# Altium footprint library Miscellaneous Devices.PcbLib: 306 footprints (part 5 of 20)
Each footprint in its own frame and in the unit in brackets; x right, y up, seen from the top. Pads: shape width x height; smd on the part's side, far side on the other; paste and mask are expansions set on the pad; w line width, h text height; cw(c..) or ccw(c..) is an arc to the next point about the centre after c.
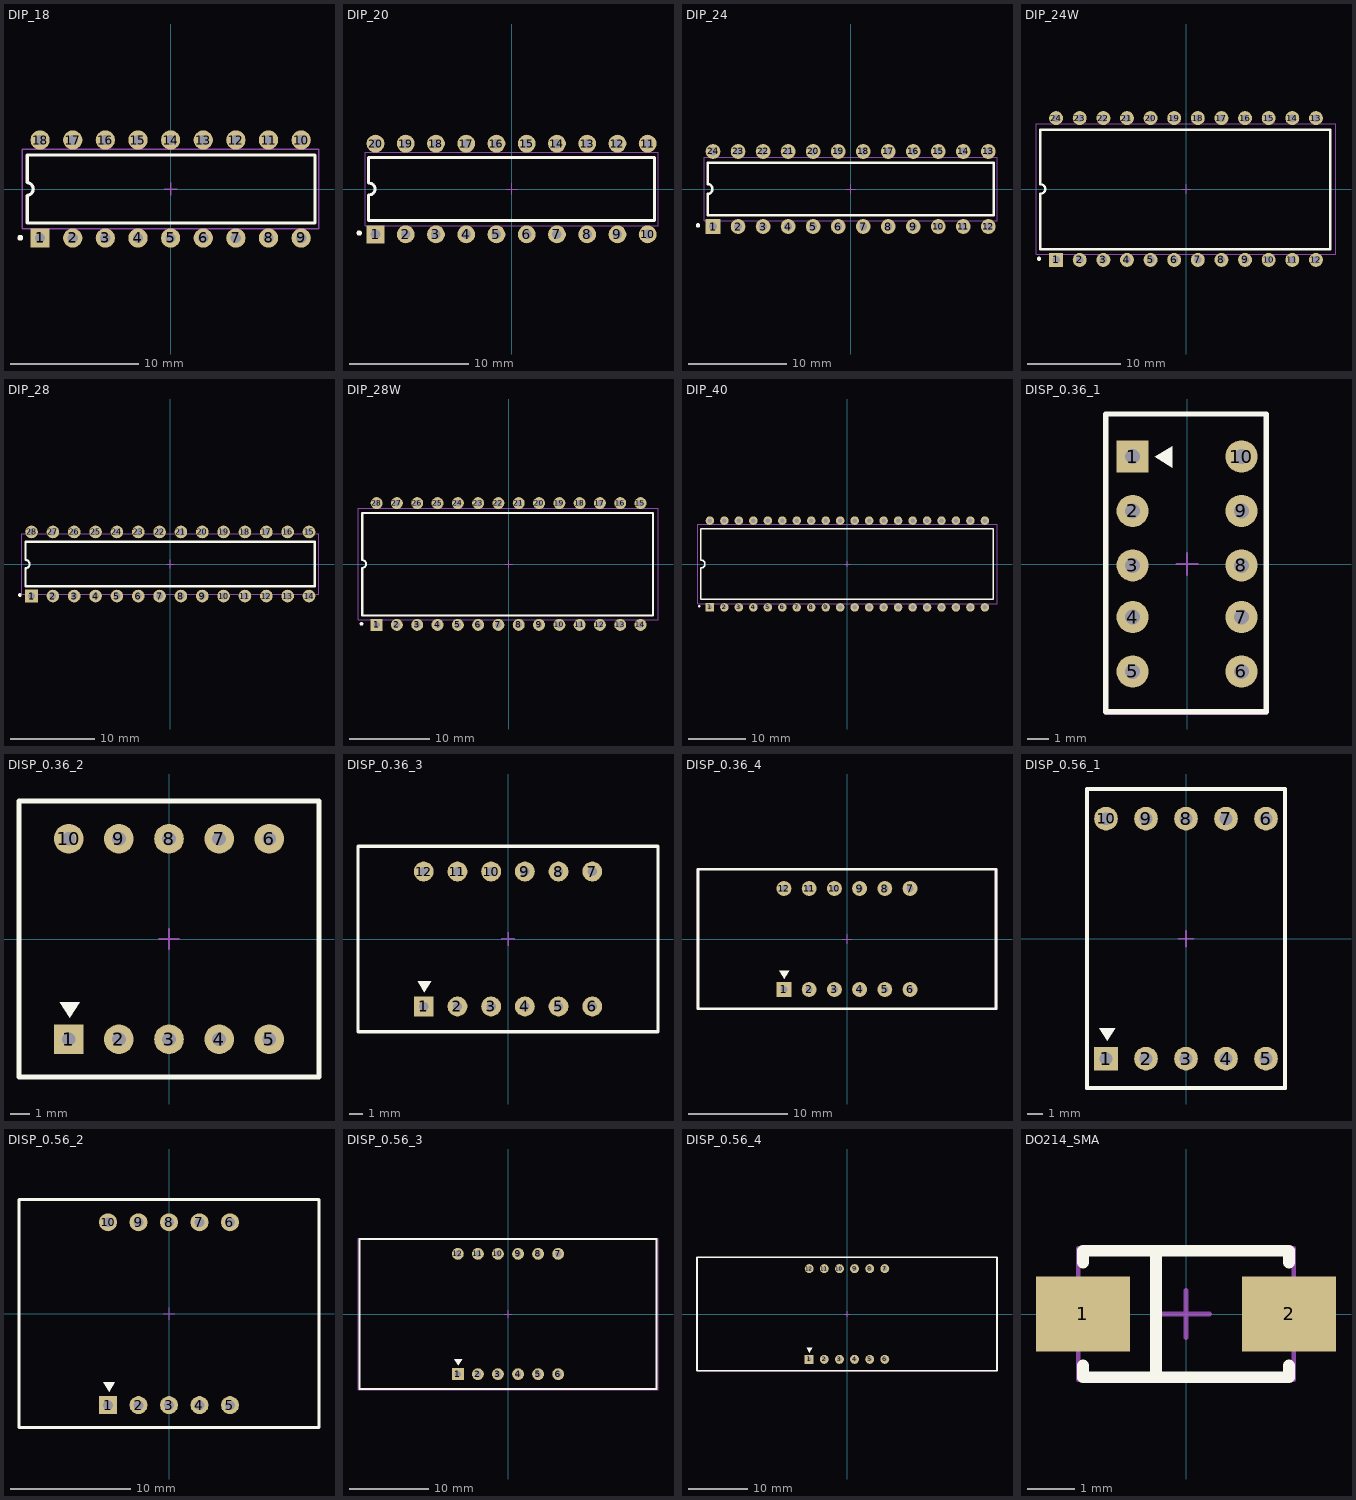
[diagram p4: the footprints below, top view; thin cyan lines are the x and y axes]

## DIP_18 [mm] "7.62"
pads (18):
  rect 1.5x1.5 hole 0.8: 1(-10.16,-3.81)
  round 1.5 hole 0.8: 2(-7.62,-3.81) 3(-5.08,-3.81) 4(-2.54,-3.81) 5(0,-3.81) 6(2.54,-3.81) 7(5.08,-3.81) 8(7.62,-3.81) 9(10.16,-3.81) 10(10.16,3.81) 11(7.62,3.81) 12(5.08,3.81) 13(2.54,3.81) 14(0,3.81) 15(-2.54,3.81) 16(-5.08,3.81) 17(-7.62,3.81) 18(-10.16,3.81)
Top Overlay:
  circle w0.254: c-11.7,-3.8 r0.1
  lines w0.254: -11.16,-2.65 11.23,-2.65 11.23,2.65 -11.16,2.65 -11.16,0.5 cw(c-11.2,0) -11.16,-0.5 -11.16,-2.65
Mechanical 15:
  lines w0.1: -0.5,0 0.5,0 ; 0,-0.5 0,0.5 ; -11.55,-3.1 -11.55,3.1 11.55,3.1 11.55,-3.1 -11.55,-3.1
3D body: height 4.57, standoff -3.81, extent -11.61,-3.9 11.63,3.92

## DIP_20 [mm] "7.62"
pads (20):
  rect 1.5x1.5 hole 0.8: 1(-11.43,-3.81)
  round 1.5 hole 0.8: 2(-8.89,-3.81) 3(-6.35,-3.81) 4(-3.81,-3.81) 5(-1.27,-3.81) 6(1.27,-3.81) 7(3.81,-3.81) 8(6.35,-3.81) 9(8.89,-3.81) 10(11.43,-3.81) 11(11.43,3.81) 12(8.89,3.81) 13(6.35,3.81) 14(3.81,3.81) 15(1.27,3.81) 16(-1.27,3.81) 17(-3.81,3.81) 18(-6.35,3.81) 19(-8.89,3.81) 20(-11.43,3.81)
Top Overlay:
  circle w0.254: c-12.8,-3.7 r0.1
  lines w0.254: -12,-2.65 -12,-0.5 ccw(c-11.97,0) -12,0.5 -12,2.65 12,2.65 12,-2.65 -12,-2.65
Mechanical 15:
  lines w0.1: -0.5,0 0.5,0 ; 0,-0.5 0,0.5 ; -12.3,-3.1 -12.3,3.1 12.3,3.1 12.3,-3.1 -12.3,-3.1
3D body: height 4.65, standoff -1.57, extent -12.89,-3.9 12.89,3.974

## DIP_24 [mm] "7.62"
pads (24):
  rect 1.5x1.5 hole 0.8: 1(-13.97,-3.81)
  round 1.5 hole 0.8: 2(-11.43,-3.81) 3(-8.89,-3.81) 4(-6.35,-3.81) 5(-3.81,-3.81) 6(-1.27,-3.81) 7(1.27,-3.81) 8(3.81,-3.81) 9(6.35,-3.81) 10(8.89,-3.81) 11(11.43,-3.81) 12(13.97,-3.81) 13(13.97,3.81) 14(11.43,3.81) 15(8.89,3.81) 16(6.35,3.81) 17(3.81,3.81) 18(1.27,3.81) 19(-1.27,3.81) 20(-3.81,3.81) 21(-6.35,3.81) 22(-8.89,3.81) 23(-11.43,3.81) 24(-13.97,3.81)
Top Overlay:
  circle w0.254: c-15.5,-3.7 r0.1
  lines w0.254: -14.5,-2.65 14.5,-2.65 14.5,2.65 -14.5,2.65 -14.5,0.5 cw(c-14.53,0) -14.5,-0.5 -14.5,-2.65
Mechanical 15:
  lines w0.1: -0.5,0 0.5,0 ; 0,-0.5 0,0.5 ; -14.85,-3.2 -14.85,3.2 14.85,3.2 14.85,-3.2 -14.85,-3.2
3D body: height 4.57, standoff -3.81, extent -16.03,-3.9 16.1,3.92

## DIP_24W [mm] "15.24"
pads (24):
  rect 1.5x1.5 hole 0.8: 1(-13.97,-7.62)
  round 1.5 hole 0.8: 2(-11.43,-7.62) 3(-8.89,-7.62) 4(-6.35,-7.62) 5(-3.81,-7.62) 6(-1.27,-7.62) 7(1.27,-7.62) 8(3.81,-7.62) 9(6.35,-7.62) 10(8.89,-7.62) 11(11.43,-7.62) 12(13.97,-7.62) 13(13.97,7.62) 14(11.43,7.62) 15(8.89,7.62) 16(6.35,7.62) 17(3.81,7.62) 18(1.27,7.62) 19(-1.27,7.62) 20(-3.81,7.62) 21(-6.35,7.62) 22(-8.89,7.62) 23(-11.43,7.62) 24(-13.97,7.62)
Top Overlay:
  circle w0.254: c-15.8,-7.5 r0.1
  lines w0.254: -15.67,-0.5 -15.67,-6.46 15.53,-6.46 15.53,6.38 -15.67,6.38 -15.67,0.5 ; -15.6,-0.5 ccw(c-15.63,0) -15.6,0.5
Mechanical 15:
  lines w0.1: -0.5,0 0.5,0 ; 0,-0.5 0,0.5 ; -16.13,-7 -16.13,7 16.13,7 16.13,-7 -16.13,-7
3D body: height 5.09, standoff -3.81, extent -16.13,-7.71 16.13,7.73

## DIP_28 [mm] "7.62"
pads (28):
  rect 1.5x1.5 hole 0.8: 1(-16.51,-3.81)
  round 1.5 hole 0.8: 2(-13.97,-3.81) 3(-11.43,-3.81) 4(-8.89,-3.81) 5(-6.35,-3.81) 6(-3.81,-3.81) 7(-1.27,-3.81) 8(1.27,-3.81) 9(3.81,-3.81) 10(6.35,-3.81) 11(8.89,-3.81) 12(11.43,-3.81) 13(13.97,-3.81) 14(16.51,-3.81) 15(16.51,3.81) 16(13.97,3.81) 17(11.43,3.81) 18(8.89,3.81) 19(6.35,3.81) 20(3.81,3.81) 21(1.27,3.81) 22(-1.27,3.81) 23(-3.81,3.81) 24(-6.35,3.81) 25(-8.89,3.81) 26(-11.43,3.81) 27(-13.97,3.81) 28(-16.51,3.81)
Top Overlay:
  circle w0.254: c-17.9,-3.7 r0.1
  lines w0.254: -17.21,-2.65 -17.21,-0.51 ccw(c-17.24,-0.01) -17.21,0.49 -17.21,2.65 17.19,2.65 17.19,-2.65 -17.21,-2.65
Mechanical 15:
  lines w0.1: -0.5,0 0.5,0 ; 0,-0.5 0,0.5 ; -17.7,-3.6 -17.7,3.6 17.7,3.6 17.7,-3.6 -17.7,-3.6
3D body: height 4.57, standoff -3.81, extent -17.56,-3.92 17.49,3.9

## DIP_28W [mm] "15.24"
pads (28):
  rect 1.5x1.5 hole 0.8: 1(-16.51,-7.62)
  round 1.5 hole 0.8: 2(-13.97,-7.62) 3(-11.43,-7.62) 4(-8.89,-7.62) 5(-6.35,-7.62) 6(-3.81,-7.62) 7(-1.27,-7.62) 8(1.27,-7.62) 9(3.81,-7.62) 10(6.35,-7.62) 11(8.89,-7.62) 12(11.43,-7.62) 13(13.97,-7.62) 14(16.51,-7.62) 15(16.51,7.62) 16(13.97,7.62) 17(11.43,7.62) 18(8.89,7.62) 19(6.35,7.62) 20(3.81,7.62) 21(1.27,7.62) 22(-1.27,7.62) 23(-3.81,7.62) 24(-6.35,7.62) 25(-8.89,7.62) 26(-11.43,7.62) 27(-13.97,7.62) 28(-16.51,7.62)
Top Overlay:
  circle w0.254: c-18.4,-7.5 r0.1
  lines w0.254: -18.31,-6.46 -18.31,-0.5 ccw(c-18.34,0) -18.31,0.5 -18.31,6.38 18.09,6.38 18.09,-6.46 -18.31,-6.46
Mechanical 15:
  lines w0.1: -0.5,0 0.5,0 ; 0,-0.5 0,0.5 ; -18.8,-7 18.7,-7 18.7,7 -18.8,7 -18.8,-7
3D body: height 5.09, standoff -3.81, extent -18.71,-7.76 18.63,7.68

## DIP_40 [mm] "15.24"
pads (40):
  rect 1.5x1.5 hole 0.8: 1(-24.13,-7.62)
  round 1.5 hole 0.8: 2(-21.59,-7.62) 3(-19.05,-7.62) 4(-16.51,-7.62) 5(-13.97,-7.62) 6(-11.43,-7.62) 7(-8.89,-7.62) 8(-6.35,-7.62) 9(-3.81,-7.62) 10(-1.27,-7.62) 11(1.27,-7.62) 12(3.81,-7.62) 13(6.35,-7.62) 14(8.89,-7.62) 15(11.43,-7.62) 16(13.97,-7.62) 17(16.51,-7.62) 18(19.05,-7.62) 19(21.59,-7.62) 20(24.13,-7.62) 21(24.13,7.62) 22(21.59,7.62) 23(19.05,7.62) 24(16.51,7.62) 25(13.97,7.62) 26(11.43,7.62) 27(8.89,7.62) 28(6.35,7.62) 29(3.81,7.62) 30(1.27,7.62) 31(-1.27,7.62) 32(-3.81,7.62) 33(-6.35,7.62) 34(-8.89,7.62) 35(-11.43,7.62) 36(-13.97,7.62) 37(-16.51,7.62) 38(-19.05,7.62) 39(-21.59,7.62) 40(-24.13,7.62)
Top Overlay:
  circle w0.254: c-26,-7.4 r0.1
  lines w0.254: -25.7,-6.2 -25.7,-0.7 ccw(c-25.7,0) -25.7,0.7 -25.7,6.2 25.6,6.2 25.6,-6.2 -25.7,-6.2
Mechanical 15:
  lines w0.1: -0.5,0 0.5,0 ; 0,-0.5 0,0.5 ; -26.25,-7 26.25,-7 26.25,7 -26.25,7 -26.25,-7
3D body: height 5.7, standoff -2.58, extent -26.225,-7.8 26.225,7.69

## DISP_0.36_1 [mm]
pads (10):
  rect 1.5x1.5 hole 0.7: 1(-2.54,5.017)
  round 1.5 hole 0.7: 2(-2.54,2.477) 3(-2.54,-0.063) 4(-2.54,-2.476) 5(-2.54,-5.016) 6(2.54,-5.016) 7(2.54,-2.476) 8(2.54,-0.063) 9(2.54,2.477) 10(2.54,5.017)
Top Overlay:
  region: -1.5,5 -0.7,5.5 -0.7,4.5
  lines w0.254: -3.8,-6.9 -3.8,7 3.7,7 3.7,-6.9 -3.8,-6.9
Mechanical 15:
  lines w0.1: -0.5,0 0.5,0 ; 0,-0.5 0,0.5 ; -3.8,-7 -3.8,7 3.7,7 3.7,-7 -3.8,-7
3D body: height 8.53, standoff -3.97, extent -3.8,-7 3.7,7

## DISP_0.36_2 [mm]
pads (10):
  rect 1.5x1.5 hole 0.7: 1(-5.08,-5.08)
  round 1.5 hole 0.7: 2(-2.54,-5.08) 3(0,-5.08) 4(2.54,-5.08) 5(5.08,-5.08) 6(5.08,5.08) 7(2.54,5.08) 8(0,5.08) 9(-2.54,5.08) 10(-5.08,5.08)
Top Overlay:
  region: -5.03,-4 -5.53,-3.2 -4.53,-3.2
  lines w0.254: -7.6,-7 -7.6,7 7.6,7 7.6,-7 -7.6,-7
Mechanical 15:
  lines w0.1: -0.5,0 0.5,0 ; 0,-0.5 0,0.5 ; -7.6,-7 7.6,-7 7.6,7 -7.6,7 -7.6,-7
3D body: height 7.3, standoff -3.9, extent -7.75,-7.5 7.75,7.5

## DISP_0.36_3 [mm]
pads (12):
  rect 1.5x1.5 hole 0.7: 1(-6.35,-5.08)
  round 1.5 hole 0.7: 2(-3.81,-5.08) 3(-1.27,-5.08) 4(1.27,-5.08) 5(3.81,-5.08) 6(6.35,-5.08) 7(6.35,5.08) 8(3.81,5.08) 9(1.27,5.08) 10(-1.27,5.08) 11(-3.81,5.08) 12(-6.35,5.08)
Top Overlay:
  region: -6.3,-4 -6.8,-3.2 -5.8,-3.2
  lines w0.254: -11.3,-7 -11.3,7 11.3,7 11.3,-7 -11.3,-7
Mechanical 15:
  lines w0.1: -0.5,0 0.5,0 ; 0,-0.5 0,0.5 ; -11.3,-7 11.3,-7 11.3,7 -11.3,7 -11.3,-7
3D body: height 7.1, standoff -5.5, extent -11.2,-7 11.2,7

## DISP_0.36_4 [mm]
pads (12):
  rect 1.5x1.5 hole 0.7: 1(-6.35,-5.08)
  round 1.5 hole 0.7: 2(-3.81,-5.08) 3(-1.27,-5.08) 4(1.27,-5.08) 5(3.81,-5.08) 6(6.35,-5.08) 7(6.35,5.08) 8(3.81,5.08) 9(1.27,5.08) 10(-1.27,5.08) 11(-3.81,5.08) 12(-6.35,5.08)
Top Overlay:
  region: -6.3,-4 -6.8,-3.2 -5.8,-3.2
  lines w0.254: -15,-7 -15,7 15,7 15,-7 -15,-7
Mechanical 15:
  lines w0.1: -0.5,0 0.5,0 ; 0,-0.5 0,0.5 ; -15.1,-7 15.1,-7 15.1,7 -15.1,7 -15.1,-7
3D body: height 7.2, standoff -5.4, extent -15,-7 15,7

## DISP_0.56_1 [mm]
pads (10):
  rect 1.5x1.5 hole 0.8: 1(-5.08,-7.62)
  round 1.5 hole 0.8: 2(-2.54,-7.62) 3(0,-7.62) 4(2.54,-7.62) 5(5.08,-7.62) 6(5.08,7.62) 7(2.54,7.62) 8(0,7.62) 9(-2.54,7.62) 10(-5.08,7.62)
Top Overlay:
  region: -5,-6.5 -5.5,-5.7 -4.5,-5.7
  lines w0.254: -6.3,-9.5 -6.3,9.5 6.3,9.5 6.3,-9.5 -6.3,-9.5
Mechanical 15:
  lines w0.1: -0.5,0 0.5,0 ; 0,-0.5 0,0.5 ; -6.35,-9.55 6.35,-9.55 6.35,9.5 -6.35,9.5 -6.35,-9.55
3D body: height 8.03, standoff -3.97, extent -6.35,-9.55 6.35,9.5

## DISP_0.56_2 [mm]
pads (10):
  rect 1.5x1.5 hole 0.8: 1(-5.08,-7.62)
  round 1.5 hole 0.8: 2(-2.54,-7.62) 3(0,-7.62) 4(2.54,-7.62) 5(5.08,-7.62) 6(5.08,7.62) 7(2.54,7.62) 8(0,7.62) 9(-2.54,7.62) 10(-5.08,7.62)
Top Overlay:
  region: -5,-6.5 -5.5,-5.7 -4.5,-5.7
  lines w0.254: -12.5,-9.5 -12.5,9.5 12.5,9.5 12.5,-9.5 -12.5,-9.5
Mechanical 15:
  lines w0.1: -0.5,0 0.5,0 ; 0,-0.5 0,0.5 ; -12.5,-9.55 -12.5,9.5 12.5,9.5 12.5,-9.55 -12.5,-9.55
3D body: height 8.1, standoff -1.7, extent -12.5,-9.55 12.5,9.5

## DISP_0.56_3 [mm]
pads (12):
  rect 1.5x1.5 hole 0.8: 1(-6.35,-7.62)
  round 1.5 hole 0.8: 2(-3.81,-7.62) 3(-1.27,-7.62) 4(1.27,-7.62) 5(3.81,-7.62) 6(6.35,-7.62) 7(6.35,7.62) 8(3.81,7.62) 9(1.27,7.62) 10(-1.27,7.62) 11(-3.81,7.62) 12(-6.35,7.62)
Top Overlay:
  region: -6.3,-6.5 -6.8,-5.7 -5.8,-5.7
  lines w0.254: -18.8,-9.5 18.8,-9.5 18.8,9.5 -18.8,9.5 -18.8,-9.5
Mechanical 15:
  lines w0.1: -0.5,0 0.5,0 ; 0,-0.5 0,0.5 ; -19,-9.6 -19,9.6 19,9.6 19,-9.6 -19,-9.6
3D body: height 8.1, standoff -5.5, extent -18.8,-9.5 18.8,9.5

## DISP_0.56_4 [mm]
pads (12):
  rect 1.5x1.5 hole 0.8: 1(-6.35,-7.62)
  round 1.5 hole 0.8: 2(-3.81,-7.62) 3(-1.27,-7.62) 4(1.27,-7.62) 5(3.81,-7.62) 6(6.35,-7.62) 7(6.35,7.62) 8(3.81,7.62) 9(1.27,7.62) 10(-1.27,7.62) 11(-3.81,7.62) 12(-6.35,7.62)
Top Overlay:
  region: -6.3,-6.5 -6.8,-5.7 -5.8,-5.7
  lines w0.254: -25.2,-9.5 -25.2,9.5 25.2,9.5 25.2,-9.5 -25.2,-9.5
Mechanical 15:
  lines w0.1: -0.5,0 0.5,0 ; 0,-0.5 0,0.5 ; -25.2,-9.5 25.2,-9.5 25.2,9.5 -25.2,9.5 -25.2,-9.5
3D body: height 8.1, standoff -5.5, extent -25.15,-9.5 25.25,9.5

## DO214_SMA [mm]
pads (2):
  rect 2x1.6 smd: 1(-2.2,0) 2(2.2,0)
Top Overlay:
  lines w0.254: -2.2,-1.1 -2.2,-1.35 2.2,-1.35 2.2,-1.1 ; -2.2,1.1 -2.2,1.35 2.2,1.35 2.2,1.1 ; -0.636,-1.35 -0.636,1.35
Mechanical 15:
  lines w0.1: -0.5,0 0.5,0 ; 0,-0.5 0,0.5 ; -2.3,-1.4 2.3,-1.4 2.3,1.4 -2.3,1.4 -2.3,-1.4
3D body: height 2.32, standoff 0.04, extent -2.686,-1.4 2.8,1.394